# Altium footprint library AudioMoth 1.1.PCBLIB: 193 footprints (part 6 of 13)
Each footprint in its own frame and in the unit in brackets; x right, y up, seen from the top. Pads: shape width x height; smd on the part's side, far side on the other; paste and mask are expansions set on the pad; w line width, h text height; cw(c..) or ccw(c..) is an arc to the next point about the centre after c.
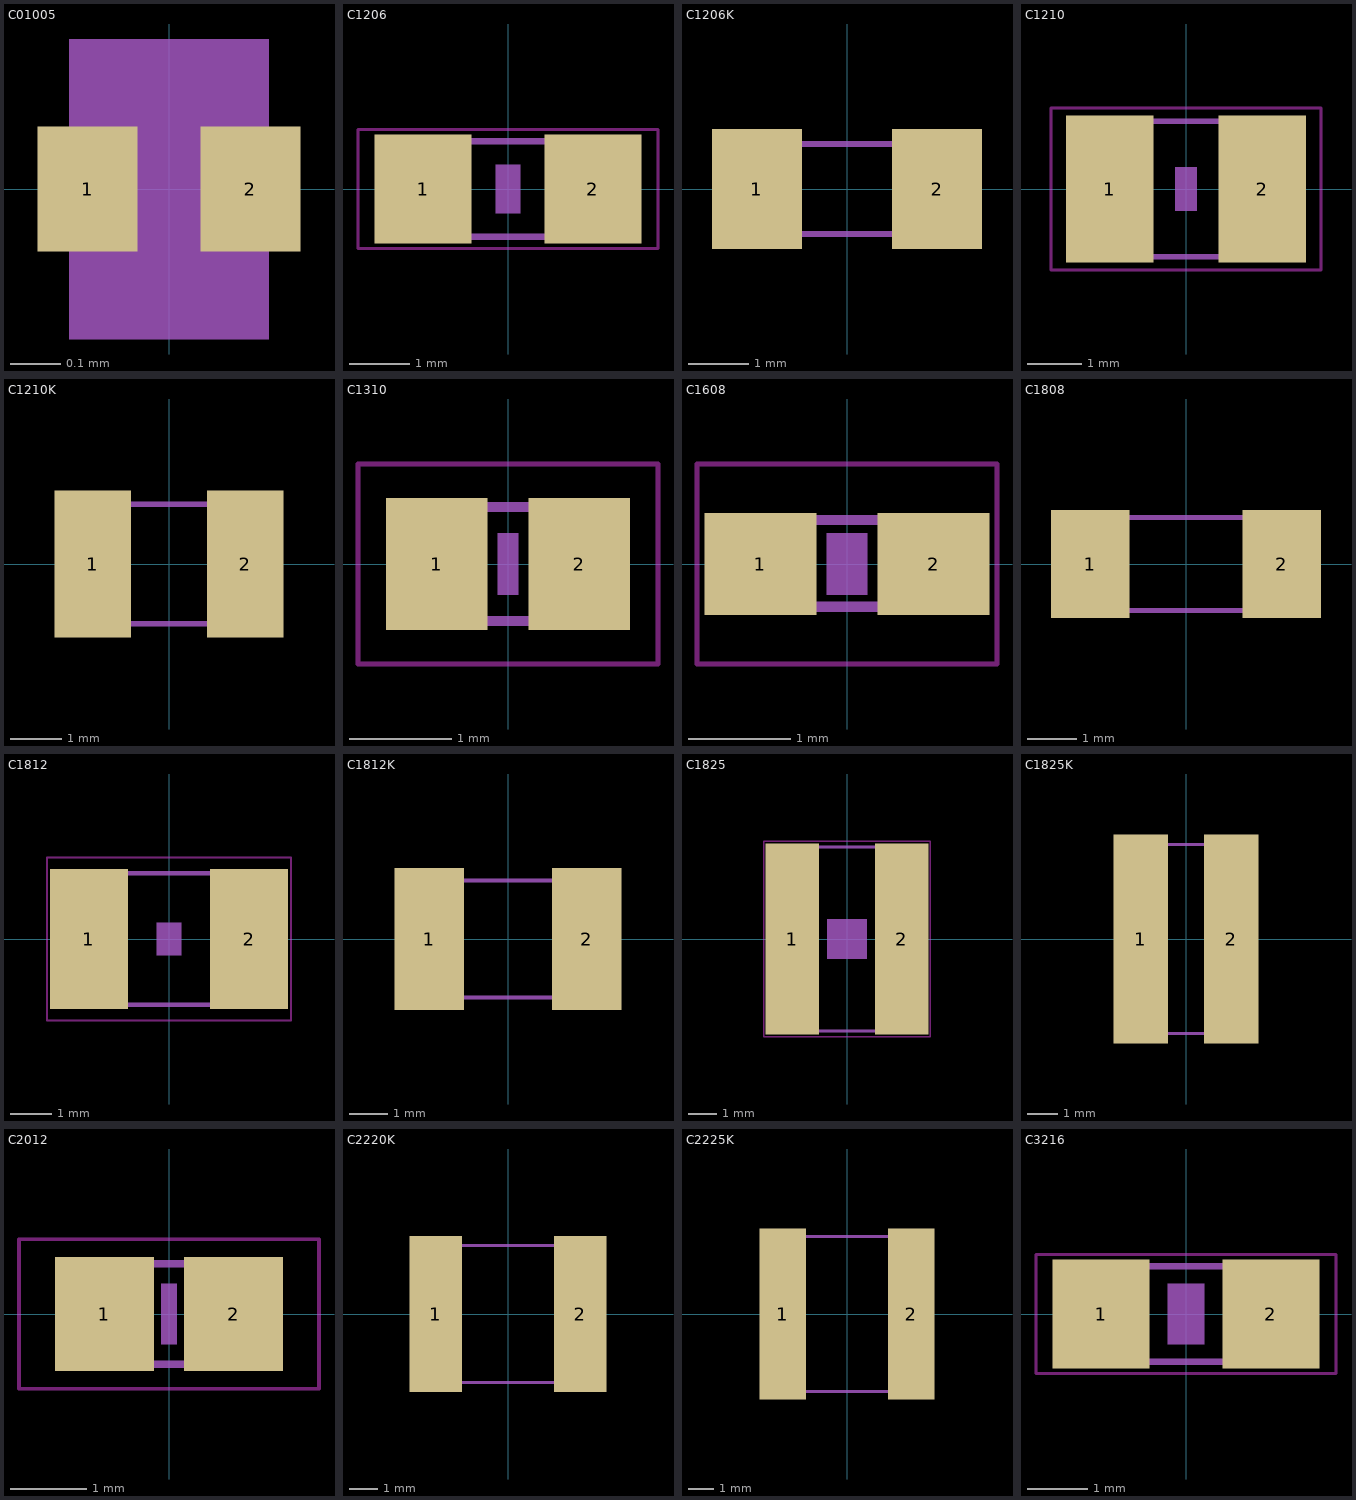
[diagram p5: the footprints below, top view; thin cyan lines are the x and y axes]

## C01005 [mm]
pads (2):
  rect 0.2x0.25 smd: 1(-0.163,0) 2(0.163,0)
tDocu:
  region: -0.2,-0.1 -0.2,0.1 -0.075,0.1 -0.075,-0.1
  region: 0.075,-0.1 0.075,0.1 0.2,0.1 0.2,-0.1
  region: -0.15,0.05 -0.15,0.1 0.15,0.1 0.15,0.05
  region: -0.15,-0.1 -0.15,-0.05 0.15,-0.05 0.15,-0.1
tGlue:
  region: -0.2,-0.3 -0.2,0.3 0.2,0.3 0.2,-0.3

## C1206 [mm]
pads (2):
  rect 1.6x1.8 smd: 1(-1.4,0) 2(1.4,0)
Top keep-out:
  lines w0.051: -2.473,-0.983 2.473,-0.983 2.473,0.983 -2.473,0.983 -2.473,-0.983
tDocu:
  region: -1.702,-0.851 -1.702,0.849 -0.952,0.849 -0.952,-0.851
  region: 0.952,-0.849 0.952,0.851 1.702,0.851 1.702,-0.849
  lines w0.102: -0.965,-0.787 0.965,-0.787 ; -0.965,0.787 0.965,0.787
tGlue:
  region: -0.2,-0.4 -0.2,0.4 0.2,0.4 0.2,-0.4

## C1206K [mm]
pads (2):
  rect 1.5x2 smd: 1(-1.5,0) 2(1.5,0)
tDocu:
  region: -1.6,-0.8 -1.6,0.8 -1.1,0.8 -1.1,-0.8
  region: 1.1,-0.8 1.1,0.8 1.6,0.8 1.6,-0.8
  lines w0.102: -1.525,-0.75 1.525,-0.75 ; -1.525,0.75 1.525,0.75

## C1210 [mm]
pads (2):
  rect 1.6x2.7 smd: 1(-1.4,0) 2(1.4,0)
Top keep-out:
  lines w0.051: -2.473,-1.483 2.473,-1.483 2.473,1.483 -2.473,1.483 -2.473,-1.483
tDocu:
  region: -1.702,-1.295 -1.702,1.305 -0.952,1.305 -0.952,-1.295
  region: 0.952,-1.305 0.952,1.295 1.702,1.295 1.702,-1.305
  lines w0.102: -0.965,-1.245 0.965,-1.245 ; -0.965,1.245 0.965,1.245
tGlue:
  region: -0.2,-0.4 -0.2,0.4 0.2,0.4 0.2,-0.4

## C1210K [mm]
pads (2):
  rect 1.5x2.9 smd: 1(-1.5,0) 2(1.5,0)
tDocu:
  region: -1.6,-1.25 -1.6,1.25 -1.1,1.25 -1.1,-1.25
  region: 1.1,-1.25 1.1,1.25 1.6,1.25 1.6,-1.25
  lines w0.102: -1.525,-1.175 1.525,-1.175 ; -1.525,1.175 1.525,1.175

## C1310 [mm]
pads (2):
  rect 1x1.3 smd: 1(-0.7,0) 2(0.7,0)
Top keep-out:
  lines w0.051: -1.473,-0.983 1.473,-0.983 1.473,0.983 -1.473,0.983 -1.473,-0.983
tDocu:
  region: -0.66,-0.622 -0.66,0.628 -0.28,0.628 -0.28,-0.622
  region: 0.279,-0.622 0.279,0.628 0.659,0.628 0.659,-0.622
  lines w0.102: -0.294,-0.559 0.294,-0.559 ; -0.294,0.559 0.294,0.559
tGlue:
  region: -0.1,-0.3 -0.1,0.3 0.1,0.3 0.1,-0.3

## C1608 [mm]
pads (2):
  rect 1.1x1 smd: 1(-0.85,0) 2(0.85,0)
Top keep-out:
  lines w0.051: -1.473,-0.983 1.473,-0.983 1.473,0.983 -1.473,0.983 -1.473,-0.983
tDocu:
  region: -0.838,-0.47 -0.838,0.48 -0.338,0.48 -0.338,-0.47
  region: 0.33,-0.47 0.33,0.48 0.83,0.48 0.83,-0.47
  lines w0.102: -0.356,-0.419 0.356,-0.419 ; -0.356,0.432 0.356,0.432
tGlue:
  region: -0.2,-0.3 -0.2,0.3 0.2,0.3 0.2,-0.3

## C1808 [mm]
pads (2):
  rect 1.6x2.2 smd: 1(-1.95,0) 2(1.95,0)
tDocu:
  region: -2.275,-1.015 -2.275,1.015 -1.225,1.015 -1.225,-1.015
  region: 1.225,-1.015 1.225,1.015 2.275,1.015 2.275,-1.015
  lines w0.102: -1.473,0.95 1.473,0.95 ; -1.448,-0.95 1.473,-0.95

## C1812 [mm]
pads (2):
  rect 1.9x3.4 smd: 1(-1.95,0) 2(1.95,0)
Top keep-out:
  lines w0.051: -2.973,-1.983 2.973,-1.983 2.973,1.983 -2.973,1.983 -2.973,-1.983
tDocu:
  region: -2.388,-1.651 -2.388,1.649 -1.438,1.649 -1.438,-1.651
  region: 1.448,-1.651 1.448,1.649 2.398,1.649 2.398,-1.651
  lines w0.102: -1.473,1.6 1.473,1.6 ; -1.448,-1.6 1.473,-1.6
tGlue:
  region: -0.3,-0.4 -0.3,0.4 0.3,0.4 0.3,-0.4

## C1812K [mm]
pads (2):
  rect 1.8x3.7 smd: 1(-2.05,0) 2(2.05,0)
tDocu:
  region: -2.25,-1.6 -2.25,1.6 -1.65,1.6 -1.65,-1.6
  region: 1.65,-1.6 1.65,1.6 2.25,1.6 2.25,-1.6
  lines w0.102: -2.175,-1.525 2.175,-1.525 ; -2.175,1.525 2.175,1.525

## C1825 [mm]
pads (2):
  rect 1.9x6.8 smd: 1(-1.95,0) 2(1.95,0)
Top keep-out:
  lines w0.051: -2.973,-3.483 2.973,-3.483 2.973,3.483 -2.973,3.483 -2.973,-3.483
tDocu:
  region: -2.413,-3.353 -2.413,3.347 -1.463,3.347 -1.463,-3.353
  region: 1.448,-3.353 1.448,3.347 2.398,3.347 2.398,-3.353
  lines w0.102: -1.499,3.277 1.473,3.277 ; -1.473,-3.277 1.499,-3.277
tGlue:
  region: -0.7,-0.7 -0.7,0.7 0.7,0.7 0.7,-0.7

## C1825K [mm]
pads (2):
  rect 1.8x6.9 smd: 1(-1.5,0) 2(1.5,0)
tDocu:
  region: -1.6,-3.2 -1.6,3.2 -1.1,3.2 -1.1,-3.2
  region: 1.1,-3.2 1.1,3.2 1.6,3.2 1.6,-3.2
  lines w0.102: -1.525,-3.125 1.525,-3.125 ; -1.525,3.125 1.525,3.125

## C2012 [mm]
pads (2):
  rect 1.3x1.5 smd: 1(-0.85,0) 2(0.85,0)
Top keep-out:
  lines w0.051: -1.973,-0.983 1.973,-0.983 1.973,0.983 -1.973,0.983 -1.973,-0.983
tDocu:
  region: -1.092,-0.724 -1.092,0.726 -0.342,0.726 -0.342,-0.724
  region: 0.356,-0.724 0.356,0.726 1.106,0.726 1.106,-0.724
  lines w0.102: -0.381,0.66 0.381,0.66 ; -0.356,-0.66 0.381,-0.66
tGlue:
  region: -0.1,-0.4 -0.1,0.4 0.1,0.4 0.1,-0.4

## C2220K [mm]
pads (2):
  rect 1.85x5.5 smd: 1(-2.55,0) 2(2.55,0)
tDocu:
  region: -2.8,-2.5 -2.8,2.5 -2.2,2.5 -2.2,-2.5
  region: 2.2,-2.5 2.2,2.5 2.8,2.5 2.8,-2.5
  lines w0.102: -2.725,-2.425 2.725,-2.425 ; -2.725,2.425 2.725,2.425

## C2225K [mm]
pads (2):
  rect 1.85x6.8 smd: 1(-2.55,0) 2(2.55,0)
tDocu:
  region: -2.8,-3.15 -2.8,3.15 -2.2,3.15 -2.2,-3.15
  region: 2.2,-3.15 2.2,3.15 2.8,3.15 2.8,-3.15
  lines w0.102: -2.725,-3.075 2.725,-3.075 ; -2.725,3.075 2.725,3.075

## C3216 [mm]
pads (2):
  rect 1.6x1.8 smd: 1(-1.4,0) 2(1.4,0)
Top keep-out:
  lines w0.051: -2.473,-0.983 2.473,-0.983 2.473,0.983 -2.473,0.983 -2.473,-0.983
tDocu:
  region: -1.702,-0.851 -1.702,0.849 -0.952,0.849 -0.952,-0.851
  region: 0.952,-0.849 0.952,0.851 1.702,0.851 1.702,-0.849
  lines w0.102: -0.965,-0.787 0.965,-0.787 ; -0.965,0.787 0.965,0.787
tGlue:
  region: -0.3,-0.5 -0.3,0.5 0.3,0.5 0.3,-0.5